# EAGLE library part CON-FPC_X05B20L10T (library dp_devices.v6)
10-pin 0.5mm pitch SMD FPC Connector X05B20L10T
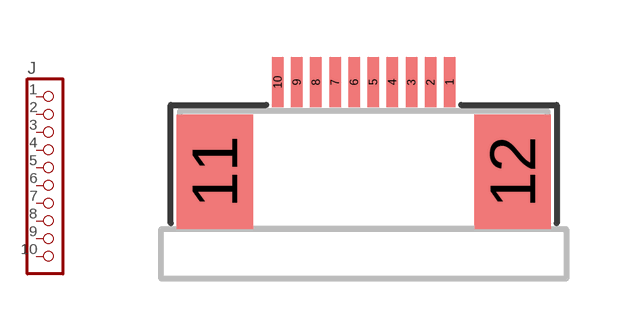
[diagram p213: symbol with the pads of X05B20L10T; footprint X05B20L10T]

Designator prefix J

## CON-FPC_X05B20L10T  [X05B20L10T]
1  1  pas
2  2  pas
3  3  pas
4  4  pas
5  5  pas
6  6  pas
7  7  pas
8  8  pas
9  9  pas
10  10  pas

## Footprint X05B20L10T (pad centres in mm)
smd 0.3 x 1.3: 1 2.25,2.35; 2 1.75,2.35; 3 1.25,2.35; 4 0.75,2.35; 5 0.25,2.35; 6 -0.25,2.35; 7 -0.75,2.35; 8 -1.25,2.35; 9 -1.75,2.35; 10 -2.25,2.35
smd 2 x 3: 11 -3.9,0; 12 3.9,0